# Altium integrated library Altium_MCU.IntLib: 35 symbols (part 1 of 2)
Pins are listed as number, name and electrical type; pins without a type are passive.

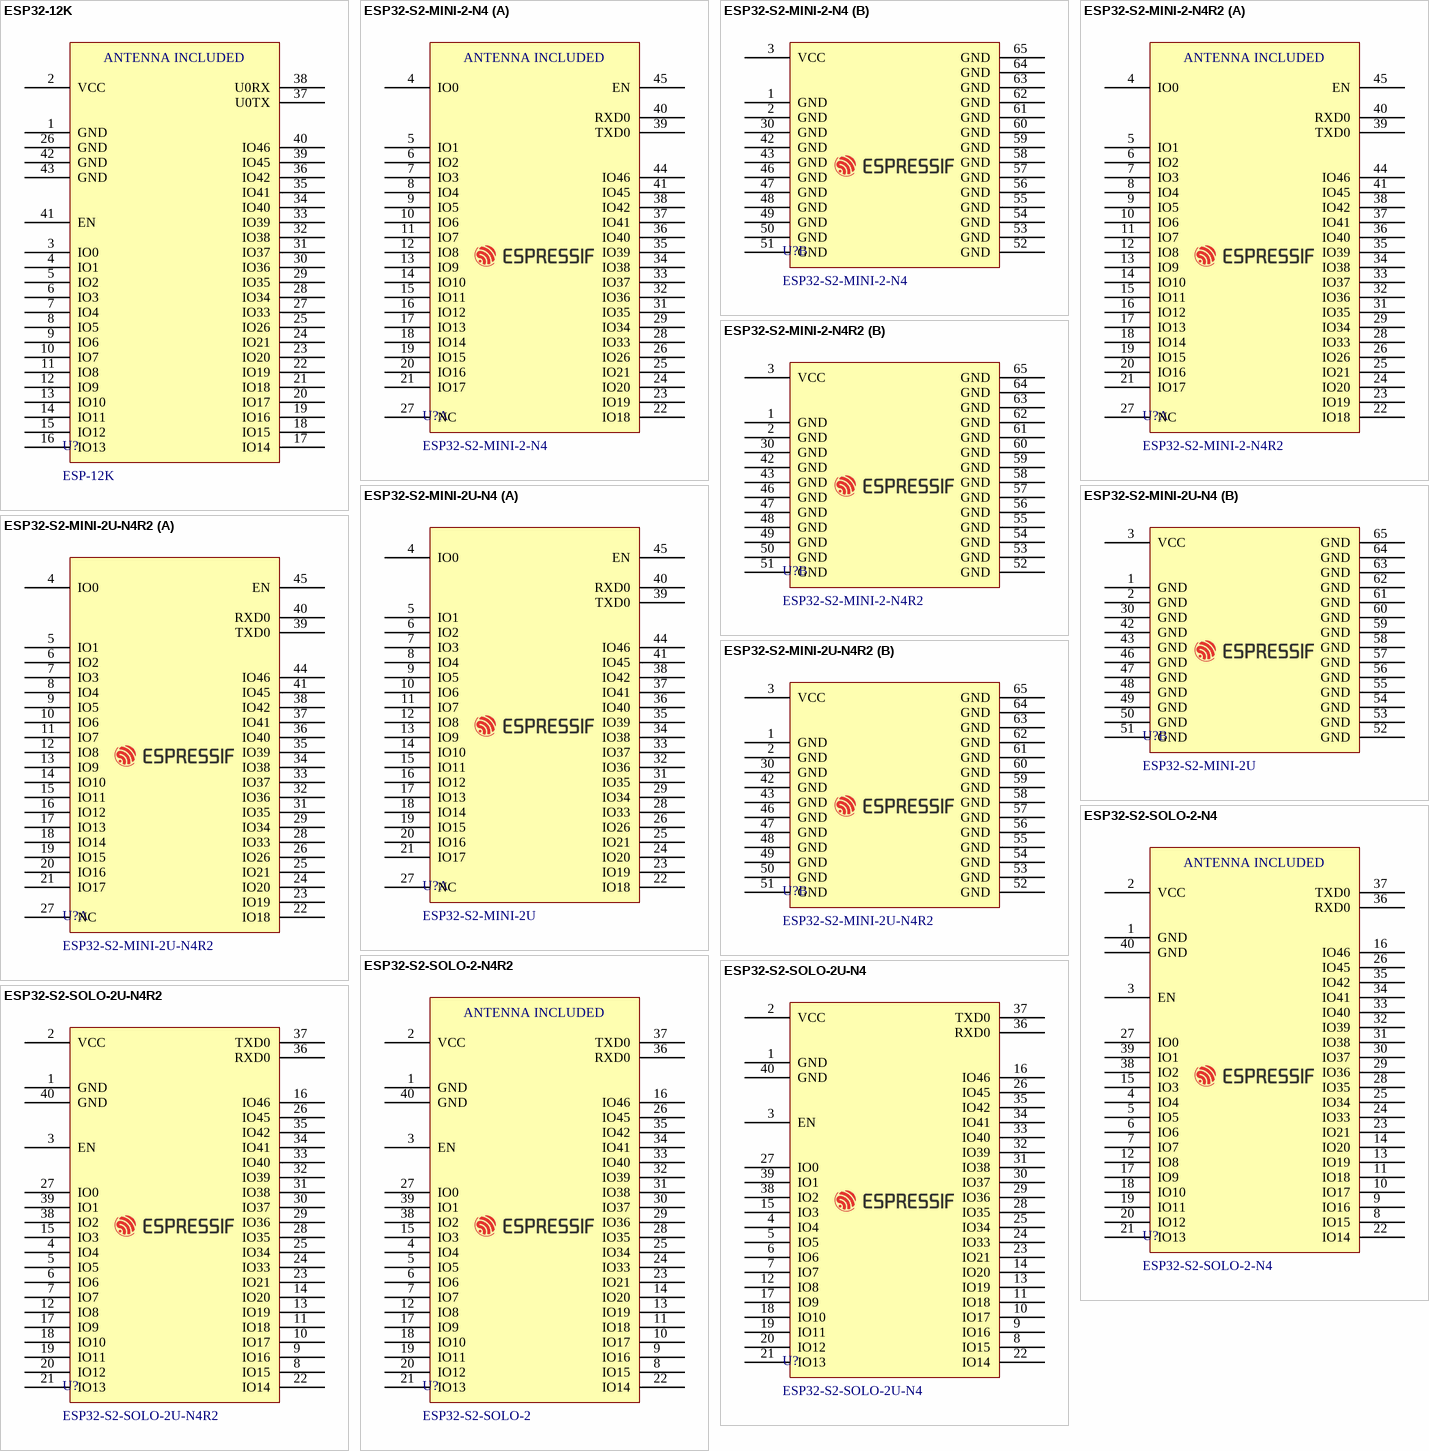
[diagram p0: symbols ESP32-12K to ESP32-S2-SOLO-2U-N4R2]

## ESP32-12K
designator U?, comment ESP-12K
ESP32-S2; Manufacturer: AI-Thinker; Supply Voltage - Max: 3.6 V; Supply Voltage - Min: 3 V; Part Number: ESP-12K; Supplier 1 URL: N/A; Supplier 2 URL: N/A; Supplier 3 URL: https://www.thegioiic.com/esp-12k-8m-psram-esp8266-ai-thinker-mach-thu-phat-wifi; Value: ESP-12K; Manufacturer Part Number: ESP-12K; Packaging: Tape and Reel; Supplier 1: Mouser; Supplier 1 Part Number: N/A; Supplier 2: Digi-Key; Supplier 2 Part Number: N/A; Supplier 3: thegioiic; Supplier 3 Part Number: ESP-12K; Mount: SMD/SMT; Operating Temperature Max: + 85 C; Operating Temperature Min: - 40 C; ComponentLink1Description: Datasheet; ComponentLink1URL: N/A; LCSC Part #: N/A
footprint ESP32-12K (Chip Array, Concave, 41-Leads, Pitch 1.50mm,  Body 31.00x18.00mm,  IPC Medium Density)
pins: 1 GND, 2 VCC, 3 IO0, 4 IO1, 5 IO2, 6 IO3, 7 IO4, 8 IO5, 9 IO6, 10 IO7, 11 IO8, 12 IO9, 13 IO10, 14 IO11, 15 IO12, 16 IO13, 17 IO14, 18 IO15, 19 IO16, 20 IO17, 21 IO18, 22 IO19, 23 IO20, 24 IO21, 25 IO26, 26 GND, 27 IO33, 28 IO34, 29 IO35, 30 IO36, 31 IO37, 32 IO38, 33 IO39, 34 IO40, 35 IO41, 36 IO42, 37 U0TX, 38 U0RX, 39 IO45, 40 IO46, 41 EN, 42 GND, 43 GND
text: ANTENNA INCLUDED

## ESP32-S2-MINI-2-N4
designator U?
ESP32-S2 embedded, Xtensa® single-core 32-bit LX7 microprocessor, up to 240 MHz; Part Number: ESP32-S2-MINI-2-N4A; Manufacturer: Espressif Systems; Supply Voltage - Max: 3.6 V; Supply Voltage - Min: 3 V; Supplier 1 URL: https://www.mouser.com/ProductDetail/Espressif-Systems/ESP32-S2-MINI-2-N4?qs=sGAEpiMZZMu3sxpa5v1qrjXjSzkapvOOr/iFVzmZzOw%3D; Supplier 2 URL: https://www.digikey.cn/en/products/detail/espressif-systems/ESP32-S2-MINI-2-N4/16591891; Supplier 3 URL: N/A; Value: ESP32-S2-MINI-2-N4; Manufacturer Part Number: ESP32-S2-MINI-2-N4; Packaging: Tape and Reel; Supplier 1: Mouser; Supplier 1 Part Number: 356-ESP32MINI-2-N4; Supplier 2: Digi-Key; Supplier 2 Part Number: 1965-ESP32-S2-MINI-2-N4CT-ND; Supplier 3: thegioiic; Supplier 3 Part Number: N/A; Mount: SMD/SMT; Operating Temperature Max: + 85 C; Operating Temperature Min: - 40 C; ComponentLink1Description: Datasheet; ComponentLink1URL: https://www.mouser.com/datasheet/2/891/Espressif_Systems_7_27_2022_ESP32_S2_MINI_22U_EN_V-3002662.pdf; LCSC Part #: N/A
footprint ESP32_MINI_OB_ANTENNA
part A pins: 4 IO0, 5 IO1, 6 IO2, 7 IO3, 8 IO4, 9 IO5, 10 IO6, 11 IO7, 12 IO8, 13 IO9, 14 IO10, 15 IO11, 16 IO12, 17 IO13, 18 IO14, 19 IO15, 20 IO16, 21 IO17, 22 IO18, 23 IO19, 24 IO20, 25 IO21, 26 IO26, 27 NC, 28 IO33, 29 IO34, 31 IO35, 32 IO36, 33 IO37, 34 IO38, 35 IO39, 36 IO40, 37 IO41, 38 IO42, 39 TXD0, 40 RXD0, 41 IO45, 44 IO46, 45 EN
part B pins: 1 GND, 2 GND, 3 VCC, 30 GND, 42 GND, 43 GND, 46 GND, 47 GND, 48 GND, 49 GND, 50 GND, 51 GND, 52 GND, 53 GND, 54 GND, 55 GND, 56 GND, 57 GND, 58 GND, 59 GND, 60 GND, 61 GND, 62 GND, 63 GND, 64 GND, 65 GND
part A text: ANTENNA INCLUDED

## ESP32-S2-MINI-2-N4R2
designator U?
ESP32-S2 embedded, Xtensa® single-core 32-bit LX7 microprocessor, up to 240 MHz; Part Number: ESP32-S2-MINI-2-N4R2A; Manufacturer: Espressif Systems; Supply Voltage - Max: 3.6 V; Supply Voltage - Min: 3 V; Supplier 1 URL: https://www.mouser.com/ProductDetail/Espressif-Systems/ESP32-S2-MINI-2-N4R2?qs=sGAEpiMZZMu3sxpa5v1qrjXjSzkapvOOJC9Dptg9ErI%3D; Supplier 2 URL: https://www.digikey.cn/en/products/detail/espressif-systems/ESP32-S2-MINI-2-N4R2/16591895; Supplier 3 URL: N/A; Value: ESP32-S2-MINI-2-N4R2; Manufacturer Part Number: ESP32-S2-MINI-2-N4R2; Packaging: Tape and Reel; Supplier 1: Mouser; Supplier 1 Part Number: ESP32-S2-MINI-2-N4R2; Supplier 2: Digi-Key; Supplier 2 Part Number: 1965-ESP32-S2-MINI-2-N4R2-ND; Supplier 3: thegioiic; Supplier 3 Part Number: N/A; Mount: SMD/SMT; Operating Temperature Max: + 85 C; Operating Temperature Min: - 40 C; ComponentLink1Description: Datasheet; ComponentLink1URL: https://www.mouser.com/datasheet/2/891/Espressif_Systems_7_27_2022_ESP32_S2_MINI_22U_EN_V-3002662.pdf; LCSC Part #: N/A
footprint ESP32_MINI_OB_ANTENNA
part A pins: 4 IO0, 5 IO1, 6 IO2, 7 IO3, 8 IO4, 9 IO5, 10 IO6, 11 IO7, 12 IO8, 13 IO9, 14 IO10, 15 IO11, 16 IO12, 17 IO13, 18 IO14, 19 IO15, 20 IO16, 21 IO17, 22 IO18, 23 IO19, 24 IO20, 25 IO21, 26 IO26, 27 NC, 28 IO33, 29 IO34, 31 IO35, 32 IO36, 33 IO37, 34 IO38, 35 IO39, 36 IO40, 37 IO41, 38 IO42, 39 TXD0, 40 RXD0, 41 IO45, 44 IO46, 45 EN
part B pins: 1 GND, 2 GND, 3 VCC, 30 GND, 42 GND, 43 GND, 46 GND, 47 GND, 48 GND, 49 GND, 50 GND, 51 GND, 52 GND, 53 GND, 54 GND, 55 GND, 56 GND, 57 GND, 58 GND, 59 GND, 60 GND, 61 GND, 62 GND, 63 GND, 64 GND, 65 GND
part A text: ANTENNA INCLUDED

## ESP32-S2-MINI-2U-N4
designator U?, comment ESP32-S2-MINI-2U
ESP32-S2 embedded, Xtensa® single-core 32-bit LX7 microprocessor, up to 240 MHz; Part Number: ESP32-S2-MINI-2U-N4A; Manufacturer: Espressif Systems; Manufacturer Part Number: ESP32-S2-MINI-2U-N4; Supply Voltage - Max: 3.6 V; Supply Voltage - Min: 3 V; Supplier 1 URL: https://www.mouser.com/ProductDetail/Espressif-Systems/ESP32-S2-MINI-2U-N4?qs=sGAEpiMZZMu3sxpa5v1qrjXjSzkapvOOhy01huix4lM%3D; Supplier 2 URL: N/A; Supplier 3 URL: N/A; Value: ESP32-S2-MINI-2U; Packaging: Tape and Reel; Supplier 1: Mouser; Supplier 1 Part Number: 356-ESP32MINI-2U-N4; Supplier 2: Digi-Key; Supplier 2 Part Number: N/A; Supplier 3: thegioiic; Supplier 3 Part Number: N/A; Mount: SMD/SMT; Operating Temperature Max: + 85 C; Operating Temperature Min: - 40 C; ComponentLink1Description: Datasheet; ComponentLink1URL: https://www.mouser.com/datasheet/2/891/Espressif_Systems_7_27_2022_ESP32_S2_MINI_22U_EN_V-3002662.pdf; LCSC Part #: N/A
footprint ESP32_MINI
part A pins: 4 IO0, 5 IO1, 6 IO2, 7 IO3, 8 IO4, 9 IO5, 10 IO6, 11 IO7, 12 IO8, 13 IO9, 14 IO10, 15 IO11, 16 IO12, 17 IO13, 18 IO14, 19 IO15, 20 IO16, 21 IO17, 22 IO18, 23 IO19, 24 IO20, 25 IO21, 26 IO26, 27 NC, 28 IO33, 29 IO34, 31 IO35, 32 IO36, 33 IO37, 34 IO38, 35 IO39, 36 IO40, 37 IO41, 38 IO42, 39 TXD0, 40 RXD0, 41 IO45, 44 IO46, 45 EN
part B pins: 1 GND, 2 GND, 3 VCC, 30 GND, 42 GND, 43 GND, 46 GND, 47 GND, 48 GND, 49 GND, 50 GND, 51 GND, 52 GND, 53 GND, 54 GND, 55 GND, 56 GND, 57 GND, 58 GND, 59 GND, 60 GND, 61 GND, 62 GND, 63 GND, 64 GND, 65 GND

## ESP32-S2-MINI-2U-N4R2
designator U?
ESP32-S2 embedded, Xtensa® single-core 32-bit LX7 microprocessor, up to 240 MHz; Part Number: ESP32-S2-MINI-2U-N4R2A; Manufacturer: Espressif Systems; Supply Voltage - Max: 3.6 V; Supply Voltage - Min: 3 V; Supplier 1 URL: https://www.mouser.com/ProductDetail/Espressif-Systems/ESP32-S2-MINI-2U-N4R2?qs=sGAEpiMZZMu3sxpa5v1qrjXjSzkapvOOZRm3ki/1tDs%3D; Supplier 2 URL: https://www.digikey.cn/en/products/detail/espressif-systems/ESP32-S2-MINI-2U-N4R2/16591889; Supplier 3 URL: N/A; Value: ESP32-S2-MINI-2U-N4R2; Manufacturer Part Number: ESP32-S2-MINI-2U-N4R2; Packaging: Tape and Reel; Supplier 1: Mouser; Supplier 1 Part Number: 356-ESP32MINI2U-N4R2; Supplier 2: Digi-Key; Supplier 2 Part Number: 1965-ESP32-S2-MINI-2U-N4R2-ND; Supplier 3: thegioiic; Supplier 3 Part Number: N/A; Mount: SMD/SMT; Operating Temperature Max: + 85 C; Operating Temperature Min: - 40 C; ComponentLink1Description: Datasheet; ComponentLink1URL: https://www.mouser.com/datasheet/2/891/Espressif_Systems_7_27_2022_ESP32_S2_MINI_22U_EN_V-3002662.pdf; LCSC Part #: N/A
footprint ESP32_MINI
part A pins: 4 IO0, 5 IO1, 6 IO2, 7 IO3, 8 IO4, 9 IO5, 10 IO6, 11 IO7, 12 IO8, 13 IO9, 14 IO10, 15 IO11, 16 IO12, 17 IO13, 18 IO14, 19 IO15, 20 IO16, 21 IO17, 22 IO18, 23 IO19, 24 IO20, 25 IO21, 26 IO26, 27 NC, 28 IO33, 29 IO34, 31 IO35, 32 IO36, 33 IO37, 34 IO38, 35 IO39, 36 IO40, 37 IO41, 38 IO42, 39 TXD0, 40 RXD0, 41 IO45, 44 IO46, 45 EN
part B pins: 1 GND, 2 GND, 3 VCC, 30 GND, 42 GND, 43 GND, 46 GND, 47 GND, 48 GND, 49 GND, 50 GND, 51 GND, 52 GND, 53 GND, 54 GND, 55 GND, 56 GND, 57 GND, 58 GND, 59 GND, 60 GND, 61 GND, 62 GND, 63 GND, 64 GND, 65 GND

## ESP32-S2-SOLO-2-N4
designator U?
ESP32-S2 embedded, Xtensa® single-core 32-bit LX7 microprocessor, up to 240 MHz; Manufacturer: Espressif Systems; Supply Voltage - Max: 3.6 V; Supply Voltage - Min: 3 V; Part Number: ESP32-S2-SOLO-2-N4; Supplier 1 URL: https://www.mouser.com/ProductDetail/Espressif-Systems/ESP32-S2-SOLO-2-N4?qs=sGAEpiMZZMu3sxpa5v1qrjXjSzkapvOOEC88hoUZJyA%3D; Supplier 2 URL: https://www.digikey.cn/en/products/detail/espressif-systems/ESP32-S2-SOLO-2-N4/16591892; Supplier 3 URL: N/A; Value: ESP32-S2-SOLO-2-N4; Manufacturer Part Number: ESP32-S2-SOLO-2-N4; Packaging: Tape and Reel; Supplier 1: Mouser; Supplier 1 Part Number: 356-ESP32SOLO-2-N4; Supplier 2: Digi-Key; Supplier 2 Part Number: 1965-ESP32-S2-SOLO-2-N4CT-ND; Supplier 3: thegioiic; Supplier 3 Part Number: N/A; Mount: SMD/SMT; Operating Temperature Max: + 85 C; Operating Temperature Min: - 40 C; ComponentLink1Description: Datasheet; ComponentLink1URL: https://www.mouser.com/datasheet/2/891/Espressif_Systems_7_27_2022_ESP32_S2_SOLO_22U_EN_v-3002658.pdf; LCSC Part #: N/A
footprint ESP32_SOLO_OB_ANTENNA
pins: 1 GND, 2 VCC, 3 EN, 4 IO4, 5 IO5, 6 IO6, 7 IO7, 8 IO15, 9 IO16, 10 IO17, 11 IO18, 12 IO8, 13 IO19, 14 IO20, 15 IO3, 16 IO46, 17 IO9, 18 IO10, 19 IO11, 20 IO12, 21 IO13, 22 IO14, 23 IO21, 24 IO33, 25 IO34, 26 IO45, 27 IO0, 28 IO35, 29 IO36, 30 IO37, 31 IO38, 32 IO39, 33 IO40, 34 IO41, 35 IO42, 36 RXD0, 37 TXD0, 38 IO2, 39 IO1, 40 GND
text: ANTENNA INCLUDED

## ESP32-S2-SOLO-2-N4R2
designator U?, comment ESP32-S2-SOLO-2
ESP32-S2 embedded, Xtensa® single-core 32-bit LX7 microprocessor, up to 240 MHz; Part Number: ESP32-S2-SOLO-2-N4R2; Manufacturer: Espressif Systems; Supply Voltage - Max: 3.6 V; Supply Voltage - Min: 3 V; Supplier 1 URL: https://www.mouser.com/ProductDetail/Espressif-Systems/ESP32-S2-SOLO-2-N4R2?qs=sGAEpiMZZMu3sxpa5v1qrjXjSzkapvOO3gwRcSEsnoY%3D; Supplier 2 URL: https://www.digikey.cn/en/products/detail/espressif-systems/ESP32-S2-SOLO-2-N4R2/16591896; Supplier 3 URL: N/A; Value: ESP32-S2-SOLO-2; Manufacturer Part Number: ESP32-S2-SOLO-2-N4R2; Packaging: Tape and Reel; Supplier 1: Mouser; Supplier 1 Part Number: 356-ESP32SOLO-2-N4R2; Supplier 2: Digi-Key; Supplier 2 Part Number: 1965-ESP32-S2-SOLO-2-N4R2TR-ND; Supplier 3: thegioiic; Supplier 3 Part Number: N/A; Mount: SMD/SMT; Operating Temperature Max: + 85 C; Operating Temperature Min: - 40 C; ComponentLink1Description: Datasheet; ComponentLink1URL: https://www.mouser.com/datasheet/2/891/Espressif_Systems_7_27_2022_ESP32_S2_SOLO_22U_EN_v-3002658.pdf; LCSC Part #: N/A
footprint ESP32_SOLO_OB_ANTENNA
pins: 1 GND, 2 VCC, 3 EN, 4 IO4, 5 IO5, 6 IO6, 7 IO7, 8 IO15, 9 IO16, 10 IO17, 11 IO18, 12 IO8, 13 IO19, 14 IO20, 15 IO3, 16 IO46, 17 IO9, 18 IO10, 19 IO11, 20 IO12, 21 IO13, 22 IO14, 23 IO21, 24 IO33, 25 IO34, 26 IO45, 27 IO0, 28 IO35, 29 IO36, 30 IO37, 31 IO38, 32 IO39, 33 IO40, 34 IO41, 35 IO42, 36 RXD0, 37 TXD0, 38 IO2, 39 IO1, 40 GND
text: ANTENNA INCLUDED

## ESP32-S2-SOLO-2U-N4
designator U?
ESP32-S2 embedded, Xtensa® single-core 32-bit LX7 microprocessor, up to 240 MHz; Manufacturer: Espressif Systems; Supply Voltage - Max: 3.6 V; Supply Voltage - Min: 3 V; Part Number: ESP32-S2-SOLO-2U-N4; Supplier 1 URL: https://www.mouser.com/ProductDetail/Espressif-Systems/ESP32-S2-SOLO-2U-N4?qs=sGAEpiMZZMu3sxpa5v1qrjXjSzkapvOOhwzZOR2/Xv4%3D; Supplier 2 URL: https://www.digikey.cn/en/products/detail/espressif-systems/ESP32-S2-SOLO-2U-N4/16591894; Supplier 3 URL: N/A; Value: ESP32-S2-SOLO-2U-N4; Manufacturer Part Number: ESP32-S2-SOLO-2U-N4; Packaging: Tape and Reel; Supplier 1: Mouser; Supplier 1 Part Number: 356-ESP32SOLO-2U-N4; Supplier 2: Digi-Key; Supplier 2 Part Number: 1965-ESP32-S2-SOLO-2U-N4CT-ND; Supplier 3: thegioiic; Supplier 3 Part Number: N/A; Mount: SMD/SMT; Operating Temperature Max: + 85 C; Operating Temperature Min: - 40 C; ComponentLink1Description: Datasheet; ComponentLink1URL: https://www.mouser.com/datasheet/2/891/Espressif_Systems_7_27_2022_ESP32_S2_SOLO_22U_EN_v-3002658.pdf; LCSC Part #: N/A
footprint ESP32_SOLO
pins: 1 GND, 2 VCC, 3 EN, 4 IO4, 5 IO5, 6 IO6, 7 IO7, 8 IO15, 9 IO16, 10 IO17, 11 IO18, 12 IO8, 13 IO19, 14 IO20, 15 IO3, 16 IO46, 17 IO9, 18 IO10, 19 IO11, 20 IO12, 21 IO13, 22 IO14, 23 IO21, 24 IO33, 25 IO34, 26 IO45, 27 IO0, 28 IO35, 29 IO36, 30 IO37, 31 IO38, 32 IO39, 33 IO40, 34 IO41, 35 IO42, 36 RXD0, 37 TXD0, 38 IO2, 39 IO1, 40 GND

## ESP32-S2-SOLO-2U-N4R2
designator U?
ESP32-S2 embedded, Xtensa® single-core 32-bit LX7 microprocessor, up to 240 MHz; Manufacturer: Espressif Systems; Supply Voltage - Max: 3.6 V; Supply Voltage - Min: 3 V; Part Number: ESP32-S2-SOLO-2U-N4R2; Supplier 1 URL: https://www.mouser.com/ProductDetail/Espressif-Systems/ESP32-S2-SOLO-2U-N4R2?qs=sGAEpiMZZMu3sxpa5v1qrjXjSzkapvOO/wRv9SAyZyc%3D; Supplier 2 URL: https://www.digikey.cn/en/products/detail/espressif-systems/esp32-s2-solo-2u-n4r2/16591890; Supplier 3 URL: N/A; Value: ESP32-S2-SOLO-2U-N4R2; Manufacturer Part Number: ESP32-S2-SOLO-2U-N4R2; Packaging: Tape and Reel; Supplier 1: Mouser; Supplier 1 Part Number: 356-ESP32SOLO2U-N4R2; Supplier 2: Digi-Key; Supplier 2 Part Number: 1965-ESP32-S2-SOLO-2U-N4R2CT-ND; Supplier 3: thegioiic; Supplier 3 Part Number: N/A; Mount: SMD/SMT; Operating Temperature Max: + 85 C; Operating Temperature Min: - 40 C; ComponentLink1Description: Datasheet; ComponentLink1URL: https://www.mouser.com/datasheet/2/891/Espressif_Systems_7_27_2022_ESP32_S2_SOLO_22U_EN_v-3002658.pdf; LCSC Part #: N/A
footprint ESP32_SOLO
pins: 1 GND, 2 VCC, 3 EN, 4 IO4, 5 IO5, 6 IO6, 7 IO7, 8 IO15, 9 IO16, 10 IO17, 11 IO18, 12 IO8, 13 IO19, 14 IO20, 15 IO3, 16 IO46, 17 IO9, 18 IO10, 19 IO11, 20 IO12, 21 IO13, 22 IO14, 23 IO21, 24 IO33, 25 IO34, 26 IO45, 27 IO0, 28 IO35, 29 IO36, 30 IO37, 31 IO38, 32 IO39, 33 IO40, 34 IO41, 35 IO42, 36 RXD0, 37 TXD0, 38 IO2, 39 IO1, 40 GND

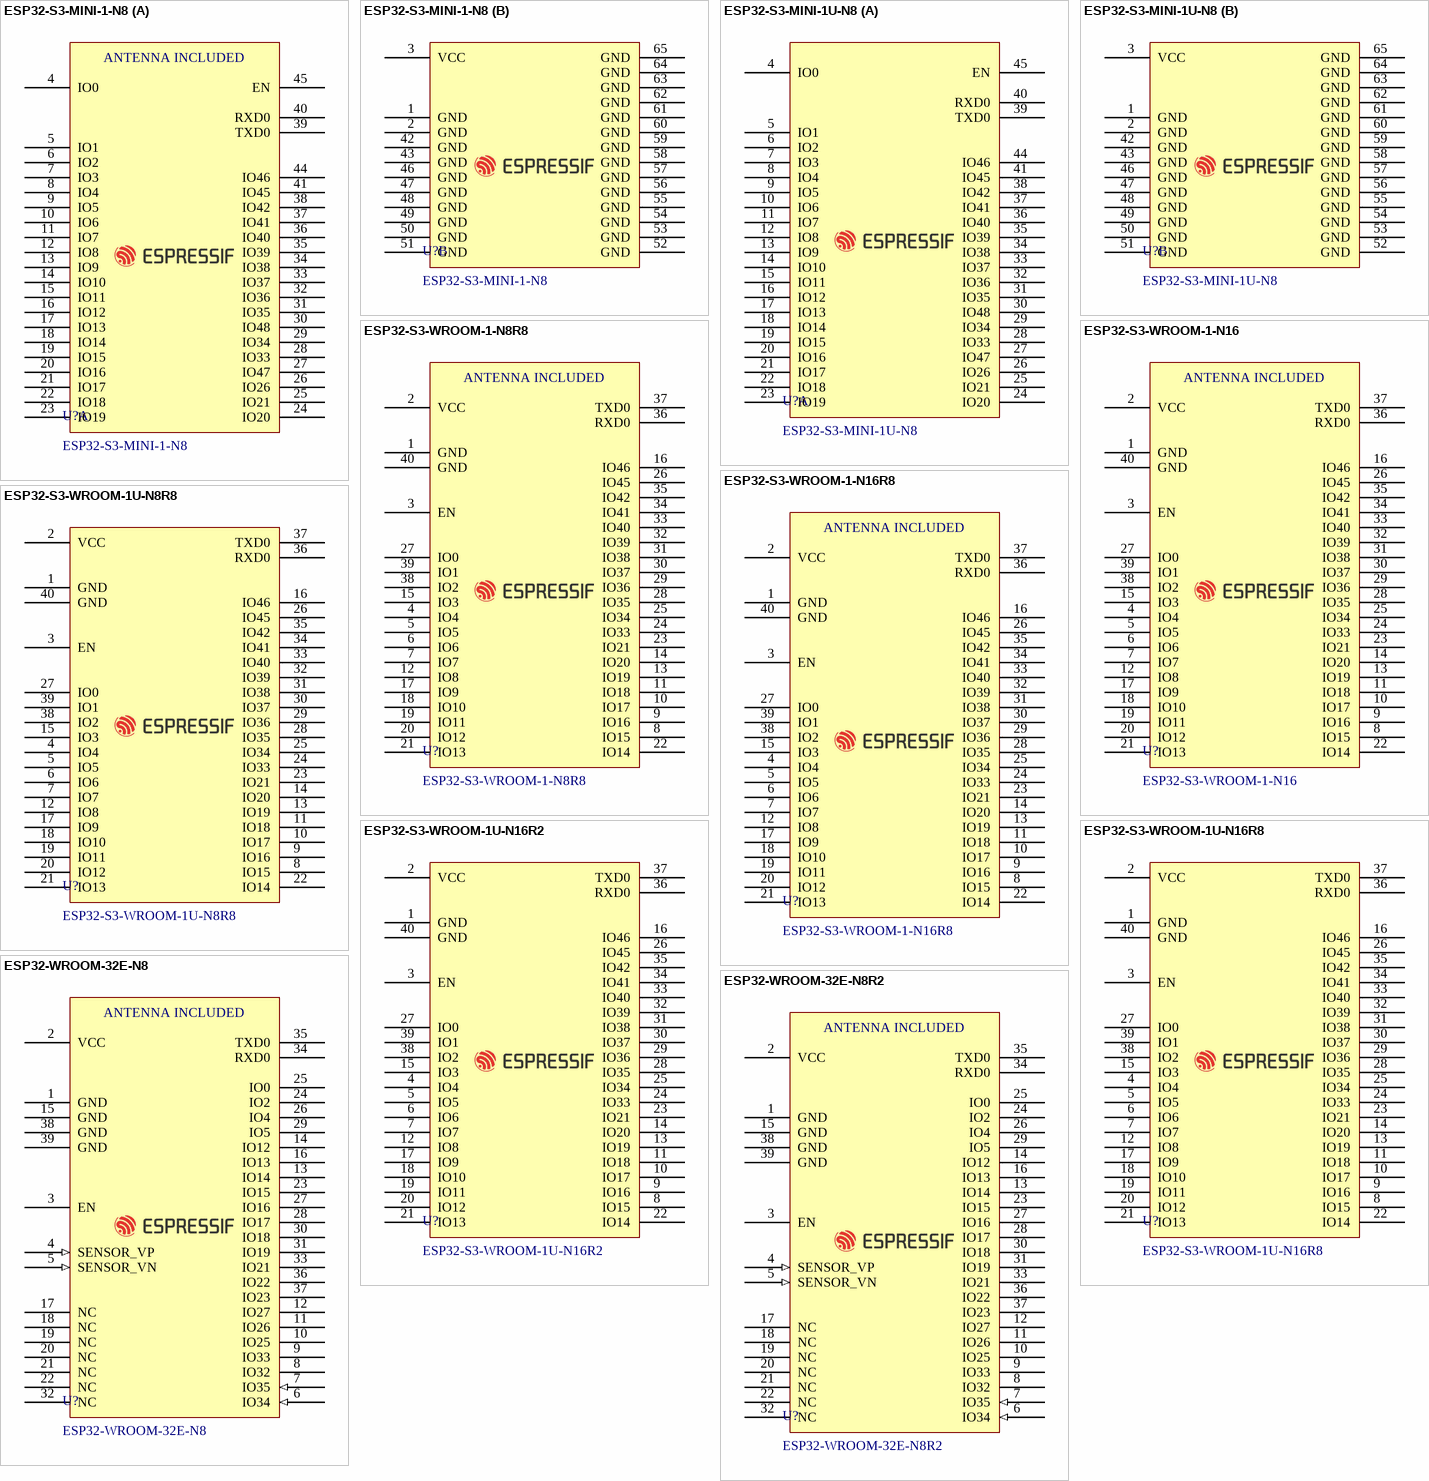
[diagram p1: symbols ESP32-S3-MINI-1-N8 to ESP32-WROOM-32E-N8R2]

## ESP32-S3-MINI-1-N8
designator U?
Xtensa® 32-bit LX7 dual-core processor that operates at up to 240 MHz; Part Number: ESP32-S3-MINI-1-N8A; Manufacturer: Espressif Systems; Supply Voltage - Max: 3.6 V; Supply Voltage - Min: 3 V; Supplier 1 URL: https://www.mouser.com/ProductDetail/Espressif-Systems/ESP32-S3-MINI-1-N8?qs=XAiT9M5g4x82rl6F/IYUQg%3D%3D&utm_source=mouser-refine-download&utm_medium=file&utm_campaign=ESP32-S3-MINI-1-N8&utm_content=Espressif-Systems; Supplier 2 URL: https://www.digikey.com/en/products/detail/espressif-systems/ESP32-S3-MINI-1-N8/15295890; Supplier 3 URL: N/A; Value: ESP32-S3-MINI-1-N8; Manufacturer Part Number: ESP32-S3-MINI-1-N8; Packaging: Tape and Reel; Supplier 1: Mouser; Supplier 1 Part Number: 356-ESP32-S3-MINI1N8; Supplier 2: Digi-Key; Supplier 2 Part Number: 1965-ESP32-S3-MINI-1-N8-ND; Supplier 3: thegioiic; Supplier 3 Part Number: N/A; Mount: SMD/SMT; Operating Temperature Max: + 85 C; Operating Temperature Min: - 40 C; ComponentLink1Description: Datasheet; ComponentLink1URL: https://www.mouser.com/datasheet/2/891/esp32_s3_mini_1_mini_1u_datasheet_en-2997643.pdf; LCSC Part #: N/A
footprint ESP32_MINI_OB_ANTENNA
part A pins: 4 IO0, 5 IO1, 6 IO2, 7 IO3, 8 IO4, 9 IO5, 10 IO6, 11 IO7, 12 IO8, 13 IO9, 14 IO10, 15 IO11, 16 IO12, 17 IO13, 18 IO14, 19 IO15, 20 IO16, 21 IO17, 22 IO18, 23 IO19, 24 IO20, 25 IO21, 26 IO26, 27 IO47, 28 IO33, 29 IO34, 30 IO48, 31 IO35, 32 IO36, 33 IO37, 34 IO38, 35 IO39, 36 IO40, 37 IO41, 38 IO42, 39 TXD0, 40 RXD0, 41 IO45, 44 IO46, 45 EN
part B pins: 1 GND, 2 GND, 3 VCC, 42 GND, 43 GND, 46 GND, 47 GND, 48 GND, 49 GND, 50 GND, 51 GND, 52 GND, 53 GND, 54 GND, 55 GND, 56 GND, 57 GND, 58 GND, 59 GND, 60 GND, 61 GND, 62 GND, 63 GND, 64 GND, 65 GND
part A text: ANTENNA INCLUDED

## ESP32-S3-MINI-1U-N8
designator U?
Xtensa® 32-bit LX7 dual-core processor that operates at up to 240 MHz; Part Number: ESP32-S3-MINI-1U-N8A; Manufacturer: Espressif Systems; Supply Voltage - Max: 3.6 V; Supply Voltage - Min: 3 V; Supplier 1 URL: https://www.mouser.com/ProductDetail/Espressif-Systems/ESP32-S3-MINI-1U-N8?qs=IPgv5n7u5QZ2yjt9dMz22g%3D%3D; Supplier 2 URL: https://www.digikey.com/en/products/detail/espressif-systems/ESP32-S3-MINI-1U-N8/17728863?s=N4IgTCBcDaIKIGUAKBmMBaBL0FkCSAcnugIwCq6BAHCALoC%2BQA; Supplier 3 URL: N/A; Value: ESP32-S3-MINI-1U-N8; Manufacturer Part Number: ESP32-S3-MINI-1U-N8; Packaging: Tape and Reel; Supplier 1: Mouser; Supplier 1 Part Number: 356-ESP32S3MINI1UN8; Supplier 2: Digi-Key; Supplier 2 Part Number: 1965-ESP32-S3-MINI-1U-N8TR-ND; Supplier 3: thegioiic; Supplier 3 Part Number: N/A; Mount: SMD/SMT; Operating Temperature Max: + 85 C; Operating Temperature Min: - 40 C; ComponentLink1Description: Datasheet; ComponentLink1URL: https://www.mouser.com/datasheet/2/891/esp32_s3_mini_1_mini_1u_datasheet_en-2997643.pdf; LCSC Part #: N/A
footprint ESP32_MINI
part A pins: 4 IO0, 5 IO1, 6 IO2, 7 IO3, 8 IO4, 9 IO5, 10 IO6, 11 IO7, 12 IO8, 13 IO9, 14 IO10, 15 IO11, 16 IO12, 17 IO13, 18 IO14, 19 IO15, 20 IO16, 21 IO17, 22 IO18, 23 IO19, 24 IO20, 25 IO21, 26 IO26, 27 IO47, 28 IO33, 29 IO34, 30 IO48, 31 IO35, 32 IO36, 33 IO37, 34 IO38, 35 IO39, 36 IO40, 37 IO41, 38 IO42, 39 TXD0, 40 RXD0, 41 IO45, 44 IO46, 45 EN
part B pins: 1 GND, 2 GND, 3 VCC, 42 GND, 43 GND, 46 GND, 47 GND, 48 GND, 49 GND, 50 GND, 51 GND, 52 GND, 53 GND, 54 GND, 55 GND, 56 GND, 57 GND, 58 GND, 59 GND, 60 GND, 61 GND, 62 GND, 63 GND, 64 GND, 65 GND

## ESP32-S3-WROOM-1-N8R8
designator U?
Xtensa® 32-bit LX7 dual-core processor that operates at up to 240 MHz; Manufacturer: Espressif Systems; Supply Voltage - Max: 3.6 V; Supply Voltage - Min: 3 V; Part Number: ESP32-S3-WROOM-1-N8R8; Supplier 1 URL: N/A; Supplier 2 URL: https://www.digikey.com/en/products/detail/espressif-systems/ESP32-S3-WROOM-1-N8R8/15295891; Supplier 3 URL: N/A; Value: ESP32-S3-WROOM-1-N8R8; Manufacturer Part Number: ESP32-S3-WROOM-1-N8R8; Packaging: Tape and Reel; Supplier 1: Mouser; Supplier 1 Part Number: N/A; Supplier 2: Digi-Key; Supplier 2 Part Number: 1965-ESP32-S3-WROOM-1-N8R8CT-ND; Supplier 3: thegioiic; Supplier 3 Part Number: N/A; Mount: SMD/SMT; Operating Temperature Max: + 85 C; Operating Temperature Min: - 40 C; ComponentLink1Description: Datasheet; ComponentLink1URL: https://www.mouser.com/datasheet/2/891/esp32_s3_wroom_1_wroom_1u_datasheet_en-2930317.pdf; LCSC Part #: N/A
footprint ESP32_SOLO_OB_ANTENNA
pins: 1 GND, 2 VCC, 3 EN, 4 IO4, 5 IO5, 6 IO6, 7 IO7, 8 IO15, 9 IO16, 10 IO17, 11 IO18, 12 IO8, 13 IO19, 14 IO20, 15 IO3, 16 IO46, 17 IO9, 18 IO10, 19 IO11, 20 IO12, 21 IO13, 22 IO14, 23 IO21, 24 IO33, 25 IO34, 26 IO45, 27 IO0, 28 IO35, 29 IO36, 30 IO37, 31 IO38, 32 IO39, 33 IO40, 34 IO41, 35 IO42, 36 RXD0, 37 TXD0, 38 IO2, 39 IO1, 40 GND
text: ANTENNA INCLUDED

## ESP32-S3-WROOM-1-N16
designator U?
Xtensa® 32-bit LX7 dual-core processor that operates at up to 240 MHz; Manufacturer: Espressif Systems; Supply Voltage - Max: 3.6 V; Supply Voltage - Min: 3 V; Part Number: ESP32-S3-WROOM-1-N16; Supplier 1 URL: N/A; Supplier 2 URL: https://www.digikey.com/en/products/detail/espressif-systems/ESP32-S3-WROOM-1-N16/16162647; Supplier 3 URL: N/A; Value: ESP32-S3-WROOM-1-N16; Manufacturer Part Number: ESP32-S3-WROOM-1-N16; Packaging: Tape and Reel; Supplier 1: Mouser; Supplier 1 Part Number: N/A; Supplier 2: Digi-Key; Supplier 2 Part Number: 1965-ESP32-S3-WROOM-1-N16TR-ND; Supplier 3: thegioiic; Supplier 3 Part Number: N/A; Mount: SMD/SMT; Operating Temperature Max: + 85 C; Operating Temperature Min: - 40 C; ComponentLink1Description: Datasheet; ComponentLink1URL: https://www.mouser.com/datasheet/2/891/esp32_s3_wroom_1_wroom_1u_datasheet_en-2930317.pdf; LCSC Part #: N/A
footprint ESP32_SOLO_OB_ANTENNA
pins: 1 GND, 2 VCC, 3 EN, 4 IO4, 5 IO5, 6 IO6, 7 IO7, 8 IO15, 9 IO16, 10 IO17, 11 IO18, 12 IO8, 13 IO19, 14 IO20, 15 IO3, 16 IO46, 17 IO9, 18 IO10, 19 IO11, 20 IO12, 21 IO13, 22 IO14, 23 IO21, 24 IO33, 25 IO34, 26 IO45, 27 IO0, 28 IO35, 29 IO36, 30 IO37, 31 IO38, 32 IO39, 33 IO40, 34 IO41, 35 IO42, 36 RXD0, 37 TXD0, 38 IO2, 39 IO1, 40 GND
text: ANTENNA INCLUDED

## ESP32-S3-WROOM-1-N16R8
designator U?
Xtensa® 32-bit LX7 dual-core processor that operates at up to 240 MHz; Manufacturer: Espressif Systems; Supply Voltage - Max: 3.6 V; Supply Voltage - Min: 3 V; Part Number: ESP32-S3-WROOM-1-N16R8; Supplier 1 URL: N/A; Supplier 2 URL: https://www.digikey.com/en/products/detail/espressif-systems/ESP32-S3-WROOM-1-N16R8/16162642; Supplier 3 URL: N/A; Value: ESP32-S3-WROOM-1-N16R8; Manufacturer Part Number: ESP32-S3-WROOM-1-N16R8; Packaging: Tape and Reel; Supplier 1: Mouser; Supplier 1 Part Number: N/A; Supplier 2: Digi-Key; Supplier 2 Part Number: 1965-ESP32-S3-WROOM-1-N16R8TR-ND; Supplier 3: thegioiic; Supplier 3 Part Number: N/A; Mount: SMD/SMT; Operating Temperature Max: + 85 C; Operating Temperature Min: - 40 C; ComponentLink1Description: Datasheet; ComponentLink1URL: https://www.mouser.com/datasheet/2/891/esp32_s3_wroom_1_wroom_1u_datasheet_en-2930317.pdf; LCSC Part #: N/A
footprint ESP32_SOLO_OB_ANTENNA
pins: 1 GND, 2 VCC, 3 EN, 4 IO4, 5 IO5, 6 IO6, 7 IO7, 8 IO15, 9 IO16, 10 IO17, 11 IO18, 12 IO8, 13 IO19, 14 IO20, 15 IO3, 16 IO46, 17 IO9, 18 IO10, 19 IO11, 20 IO12, 21 IO13, 22 IO14, 23 IO21, 24 IO33, 25 IO34, 26 IO45, 27 IO0, 28 IO35, 29 IO36, 30 IO37, 31 IO38, 32 IO39, 33 IO40, 34 IO41, 35 IO42, 36 RXD0, 37 TXD0, 38 IO2, 39 IO1, 40 GND
text: ANTENNA INCLUDED

## ESP32-S3-WROOM-1U-N8R8
designator U?
Xtensa® 32-bit LX7 dual-core processor that operates at up to 240 MHz; Manufacturer: Espressif Systems; Supply Voltage - Max: 3.6 V; Supply Voltage - Min: 3 V; Part Number: ESP32-S3-WROOM-1U-N8R8; Supplier 1 URL: N/A; Supplier 2 URL: https://www.digikey.com/en/products/detail/espressif-systems/ESP32-S3-WROOM-1U-N8R8/16162638; Supplier 3 URL: N/A; Value: ESP32-S3-WROOM-1U-N8R8; Manufacturer Part Number: ESP32-S3-WROOM-1U-N8R8; Packaging: Tape and Reel; Supplier 1: Mouser; Supplier 1 Part Number: N/A; Supplier 2: Digi-Key; Supplier 2 Part Number: 1965-ESP32-S3-WROOM-1U-N8R8TR-ND; Supplier 3: thegioiic; Supplier 3 Part Number: N/A; Mount: SMD/SMT; Operating Temperature Max: + 85 C; Operating Temperature Min: - 40 C; ComponentLink1Description: Datasheet; ComponentLink1URL: https://www.mouser.com/datasheet/2/891/esp32_s3_wroom_1_wroom_1u_datasheet_en-2930317.pdf; LCSC Part #: N/A
footprint ESP32_SOLO
pins: 1 GND, 2 VCC, 3 EN, 4 IO4, 5 IO5, 6 IO6, 7 IO7, 8 IO15, 9 IO16, 10 IO17, 11 IO18, 12 IO8, 13 IO19, 14 IO20, 15 IO3, 16 IO46, 17 IO9, 18 IO10, 19 IO11, 20 IO12, 21 IO13, 22 IO14, 23 IO21, 24 IO33, 25 IO34, 26 IO45, 27 IO0, 28 IO35, 29 IO36, 30 IO37, 31 IO38, 32 IO39, 33 IO40, 34 IO41, 35 IO42, 36 RXD0, 37 TXD0, 38 IO2, 39 IO1, 40 GND

## ESP32-S3-WROOM-1U-N16R2
designator U?
Xtensa® 32-bit LX7 dual-core processor that operates at up to 240 MHz; Manufacturer: Espressif Systems; Supply Voltage - Max: 3.6 V; Supply Voltage - Min: 3 V; Part Number: ESP32-S3-WROOM-1U-N16R2; Supplier 1 URL: N/A; Supplier 2 URL: https://www.digikey.com/en/products/detail/espressif-systems/ESP32-S3-WROOM-1U-N16R2/16162650; Supplier 3 URL: N/A; Value: ESP32-S3-WROOM-1U-N16R2; Manufacturer Part Number: ESP32-S3-WROOM-1U-N16R2; Packaging: Tape and Reel; Supplier 1: Mouser; Supplier 1 Part Number: N/A; Supplier 2: Digi-Key; Supplier 2 Part Number: 1965-ESP32-S3-WROOM-1U-N16R2TR-ND; Supplier 3: thegioiic; Supplier 3 Part Number: N/A; Mount: SMD/SMT; Operating Temperature Max: + 85 C; Operating Temperature Min: - 40 C; ComponentLink1Description: Datasheet; ComponentLink1URL: https://www.mouser.com/datasheet/2/891/esp32_s3_wroom_1_wroom_1u_datasheet_en-2930317.pdf; LCSC Part #: N/A
footprint ESP32_SOLO
pins: 1 GND, 2 VCC, 3 EN, 4 IO4, 5 IO5, 6 IO6, 7 IO7, 8 IO15, 9 IO16, 10 IO17, 11 IO18, 12 IO8, 13 IO19, 14 IO20, 15 IO3, 16 IO46, 17 IO9, 18 IO10, 19 IO11, 20 IO12, 21 IO13, 22 IO14, 23 IO21, 24 IO33, 25 IO34, 26 IO45, 27 IO0, 28 IO35, 29 IO36, 30 IO37, 31 IO38, 32 IO39, 33 IO40, 34 IO41, 35 IO42, 36 RXD0, 37 TXD0, 38 IO2, 39 IO1, 40 GND

## ESP32-S3-WROOM-1U-N16R8
designator U?
Xtensa® 32-bit LX7 dual-core processor that operates at up to 240 MHz; Manufacturer: Espressif Systems; Supply Voltage - Max: 3.6 V; Supply Voltage - Min: 3 V; Part Number: ESP32-S3-WROOM-1U-N16R8; Supplier 1 URL: N/A; Supplier 2 URL: https://www.digikey.com/en/products/detail/espressif-systems/ESP32-S3-WROOM-1U-N16R8/16162641; Supplier 3 URL: N/A; Value: ESP32-S3-WROOM-1U-N16R8; Manufacturer Part Number: ESP32-S3-WROOM-1U-N16R8; Packaging: Tape and Reel; Supplier 1: Mouser; Supplier 1 Part Number: N/A; Supplier 2: Digi-Key; Supplier 2 Part Number: 1965-ESP32-S3-WROOM-1U-N16R8TR-ND; Supplier 3: thegioiic; Supplier 3 Part Number: N/A; Mount: SMD/SMT; Operating Temperature Max: + 85 C; Operating Temperature Min: - 40 C; ComponentLink1Description: Datasheet; ComponentLink1URL: https://www.mouser.com/datasheet/2/891/esp32_s3_wroom_1_wroom_1u_datasheet_en-2930317.pdf; LCSC Part #: N/A
footprint ESP32_SOLO
pins: 1 GND, 2 VCC, 3 EN, 4 IO4, 5 IO5, 6 IO6, 7 IO7, 8 IO15, 9 IO16, 10 IO17, 11 IO18, 12 IO8, 13 IO19, 14 IO20, 15 IO3, 16 IO46, 17 IO9, 18 IO10, 19 IO11, 20 IO12, 21 IO13, 22 IO14, 23 IO21, 24 IO33, 25 IO34, 26 IO45, 27 IO0, 28 IO35, 29 IO36, 30 IO37, 31 IO38, 32 IO39, 33 IO40, 34 IO41, 35 IO42, 36 RXD0, 37 TXD0, 38 IO2, 39 IO1, 40 GND

## ESP32-WROOM-32E-N8
designator U?
These are ESP32-D0WD-based modules with integrated flash. These modules are well suited for Wi-Fi and Bluetooth/Bluetooth LE-based connectivity applications and provide a solid dual-core performance.; Manufacturer: Espressif Systems; Supply Voltage - Max: 3.6 V; Supply Voltage - Min: 3 V; Part Number: ESP32-WROOM-32E-N8; Supplier 1 URL: N/A; Supplier 2 URL: https://www.digikey.com/en/products/detail/espressif-systems/esp32-wroom-32e-n8/13159522; Supplier 3 URL: N/A; Value: ESP32-WROOM-32E-N8; Manufacturer Part Number: ESP32-WROOM-32E-N8; Packaging: Tape and Reel; Supplier 1: Mouser; Supplier 1 Part Number: N/A; Supplier 2: Digi-Key; Supplier 2 Part Number: 1965-ESP32-WROOM-32E-N8TR-ND; Supplier 3: thegioiic; Supplier 3 Part Number: N/A; Mount: SMD/SMT; Operating Temperature Max: + 85 C; Operating Temperature Min: - 40 C; ComponentLink1Description: Datasheet; ComponentLink1URL: https://www.mouser.com/datasheet/2/891/esp32_wroom_32e_esp32_wroom_32ue_datasheet_en-1855879.pdf; LCSC Part #: C701342
footprint ESP32_WROOM_OB_ANTENNA
pins: 1 GND, 2 VCC, 3 EN, 4 SENSOR_VP (in), 5 SENSOR_VN (in), 6 IO34 (in), 7 IO35 (in), 8 IO32, 9 IO33, 10 IO25, 11 IO26, 12 IO27, 13 IO14, 14 IO12, 15 GND, 16 IO13, 17 NC, 18 NC, 19 NC, 20 NC, 21 NC, 22 NC, 23 IO15, 24 IO2, 25 IO0, 26 IO4, 27 IO16, 28 IO17, 29 IO5, 30 IO18, 31 IO19, 32 NC, 33 IO21, 34 RXD0, 35 TXD0, 36 IO22, 37 IO23, 38 GND, 39 GND
text: ANTENNA INCLUDED

## ESP32-WROOM-32E-N8R2
designator U?
These are ESP32-D0WD-based modules with integrated flash. These modules are well suited for Wi-Fi and Bluetooth/Bluetooth LE-based connectivity applications and provide a solid dual-core performance.; Manufacturer: Espressif Systems; Supply Voltage - Max: 3.6 V; Supply Voltage - Min: 3 V; Part Number: ESP32-WROOM-32E-N8R2; Supplier 1 URL: https://www.mouser.vn/ProductDetail/Espressif-Systems/ESP32-WROOM-32E-N8R2?qs=By6Nw2ByBD0mvGJSS3Ohlw%3D%3D; Supplier 2 URL: https://www.digikey.com/en/products/detail/espressif-systems/ESP32-WROOM-32E-N8R2/16733099?s=N4IgTCBcDaIKIGUAKBmMBaA6gJQPK4Fl0050A5ADmwgF0BfIA; Supplier 3 URL: N/A; Value: ESP32-WROOM-32E-N8R2; Manufacturer Part Number: ESP32-WROOM-32E-N8R2; Packaging: Tape and Reel; Supplier 1: Mouser; Supplier 1 Part Number: 356-ESP32WRM32EN8R2; Supplier 2: Digi-Key; Supplier 2 Part Number: 1965-ESP32-WROOM-32E-N8R2TR-ND; Supplier 3: thegioiic; Supplier 3 Part Number: N/A; Mount: SMD/SMT; Operating Temperature Max: + 85 C; Operating Temperature Min: - 40 C; ComponentLink1Description: Datasheet; ComponentLink1URL: https://www.mouser.com/datasheet/2/891/esp32_wroom_32e_esp32_wroom_32ue_datasheet_en-1855879.pdf; LCSC Part #: C5361945
footprint ESP32_WROOM_OB_ANTENNA
pins: 1 GND, 2 VCC, 3 EN, 4 SENSOR_VP (in), 5 SENSOR_VN (in), 6 IO34 (in), 7 IO35 (in), 8 IO32, 9 IO33, 10 IO25, 11 IO26, 12 IO27, 13 IO14, 14 IO12, 15 GND, 16 IO13, 17 NC, 18 NC, 19 NC, 20 NC, 21 NC, 22 NC, 23 IO15, 24 IO2, 25 IO0, 26 IO4, 27 IO16, 28 IO17, 29 IO5, 30 IO18, 31 IO19, 32 NC, 33 IO21, 34 RXD0, 35 TXD0, 36 IO22, 37 IO23, 38 GND, 39 GND
text: ANTENNA INCLUDED

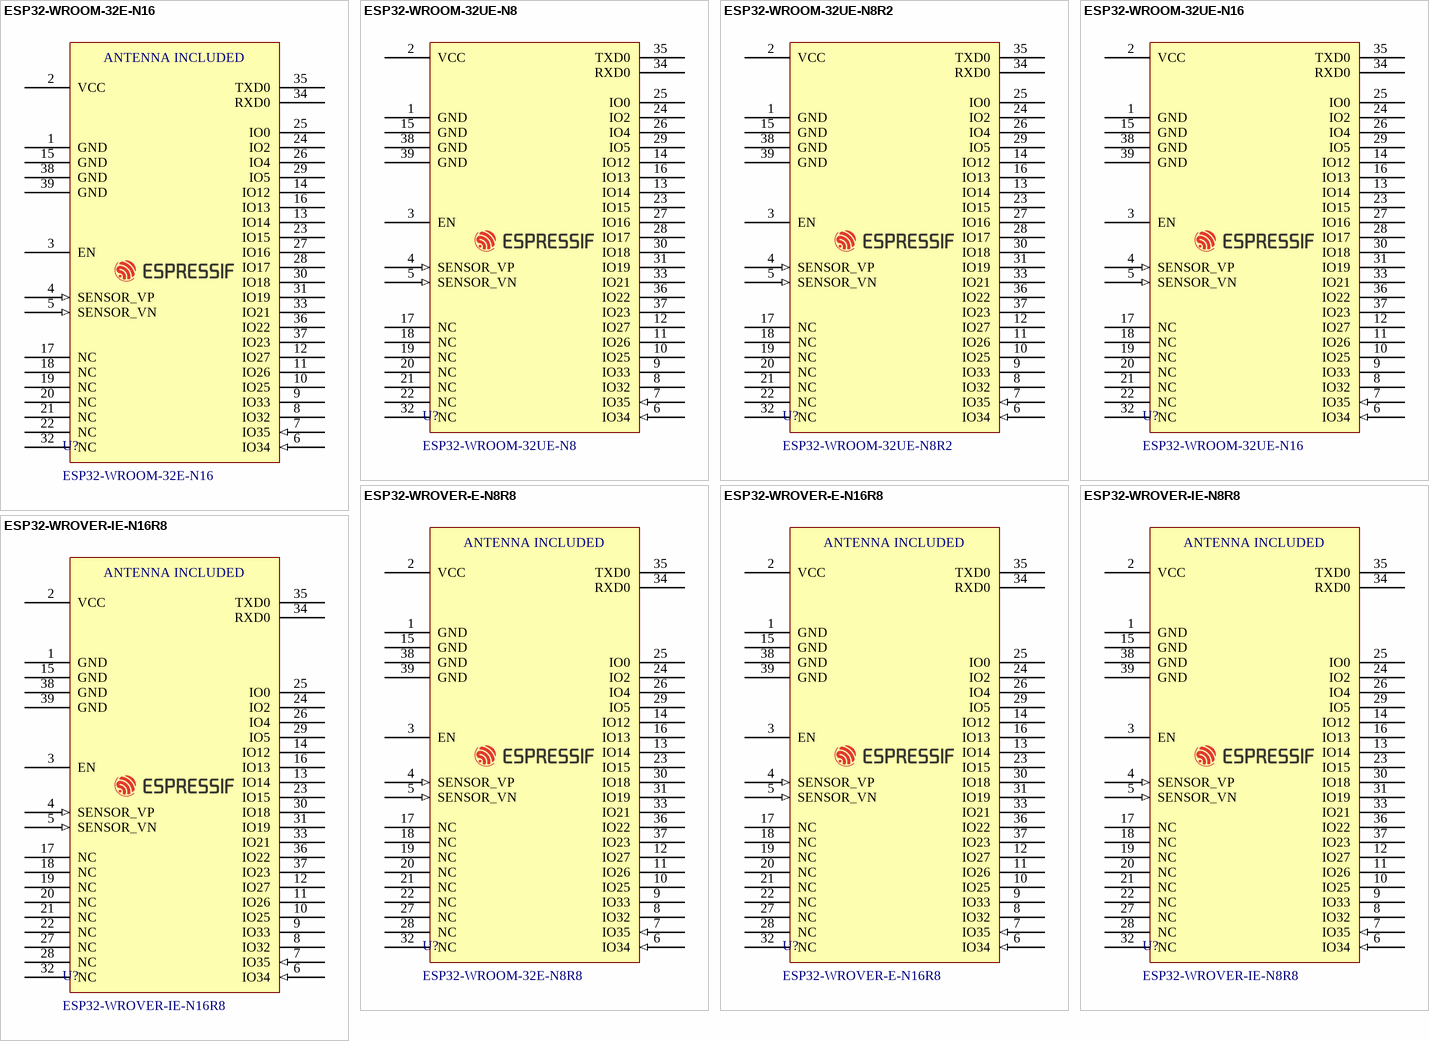
[diagram p2: symbols ESP32-WROOM-32E-N16 to ESP32-WROVER-IE-N16R8]

## ESP32-WROOM-32E-N16
designator U?
These are ESP32-D0WD-based modules with integrated flash. These modules are well suited for Wi-Fi and Bluetooth/Bluetooth LE-based connectivity applications and provide a solid dual-core performance.; Manufacturer: Espressif Systems; Supply Voltage - Max: 3.6 V; Supply Voltage - Min: 3 V; Part Number: ESP32-WROOM-32E-N16; Supplier 1 URL: N/A; Supplier 2 URL: https://www.digikey.com/en/products/detail/espressif-systems/ESP32-WROOM-32E-16MB/11613144; Supplier 3 URL: N/A; Value: ESP32-WROOM-32E-N16; Manufacturer Part Number: ESP32-WROOM-32E-N16; Packaging: Tape and Reel; Supplier 1: Mouser; Supplier 1 Part Number: N/A; Supplier 2: Digi-Key; Supplier 2 Part Number: 1965-ESP32-WROOM-32E-N16TR-ND; Supplier 3: thegioiic; Supplier 3 Part Number: N/A; Mount: SMD/SMT; Operating Temperature Max: + 85 C; Operating Temperature Min: - 40 C; ComponentLink1Description: Datasheet; ComponentLink1URL: https://www.mouser.com/datasheet/2/891/esp32_wroom_32e_esp32_wroom_32ue_datasheet_en-1855879.pdf; LCSC Part #: C701343
footprint ESP32_WROOM_OB_ANTENNA
pins: 1 GND, 2 VCC, 3 EN, 4 SENSOR_VP (in), 5 SENSOR_VN (in), 6 IO34 (in), 7 IO35 (in), 8 IO32, 9 IO33, 10 IO25, 11 IO26, 12 IO27, 13 IO14, 14 IO12, 15 GND, 16 IO13, 17 NC, 18 NC, 19 NC, 20 NC, 21 NC, 22 NC, 23 IO15, 24 IO2, 25 IO0, 26 IO4, 27 IO16, 28 IO17, 29 IO5, 30 IO18, 31 IO19, 32 NC, 33 IO21, 34 RXD0, 35 TXD0, 36 IO22, 37 IO23, 38 GND, 39 GND
text: ANTENNA INCLUDED

## ESP32-WROOM-32UE-N8
designator U?
These are ESP32-D0WD-based modules with integrated flash. These modules are well suited for Wi-Fi and Bluetooth/Bluetooth LE-based connectivity applications and provide a solid dual-core performance.; Manufacturer: Espressif Systems; Supply Voltage - Max: 3.6 V; Supply Voltage - Min: 3 V; Part Number: ESP32-WROOM-32UE-N8; Supplier 1 URL: N/A; Supplier 2 URL: https://www.digikey.com/en/products/detail/espressif-systems/ESP32-WROOM-32UE-8MB/11613142; Supplier 3 URL: N/A; Value: ESP32-WROOM-32UE-N8; Manufacturer Part Number: ESP32-WROOM-32UE-N8; Packaging: Tape and Reel; Supplier 1: Mouser; Supplier 1 Part Number: N/A; Supplier 2: Digi-Key; Supplier 2 Part Number: 1965-ESP32-WROOM-32UE-N8TR-ND; Supplier 3: thegioiic; Supplier 3 Part Number: N/A; Mount: SMD/SMT; Operating Temperature Max: + 85 C; Operating Temperature Min: - 40 C; ComponentLink1Description: Datasheet; ComponentLink1URL: https://www.mouser.com/datasheet/2/891/esp32_wroom_32e_esp32_wroom_32ue_datasheet_en-1855879.pdf; LCSC Part #: C701345
footprint ESP32_WROOM
pins: 1 GND, 2 VCC, 3 EN, 4 SENSOR_VP (in), 5 SENSOR_VN (in), 6 IO34 (in), 7 IO35 (in), 8 IO32, 9 IO33, 10 IO25, 11 IO26, 12 IO27, 13 IO14, 14 IO12, 15 GND, 16 IO13, 17 NC, 18 NC, 19 NC, 20 NC, 21 NC, 22 NC, 23 IO15, 24 IO2, 25 IO0, 26 IO4, 27 IO16, 28 IO17, 29 IO5, 30 IO18, 31 IO19, 32 NC, 33 IO21, 34 RXD0, 35 TXD0, 36 IO22, 37 IO23, 38 GND, 39 GND

## ESP32-WROOM-32UE-N8R2
designator U?
These are ESP32-D0WD-based modules with integrated flash. These modules are well suited for Wi-Fi and Bluetooth/Bluetooth LE-based connectivity applications and provide a solid dual-core performance.; Manufacturer: Espressif Systems; Supply Voltage - Max: 3.6 V; Supply Voltage - Min: 3 V; Part Number: ESP32-WROOM-32UE-N8R2; Supplier 1 URL: N/A; Supplier 2 URL: https://www.digikey.com/en/products/detail/espressif-systems/ESP32-WROOM-32UE-N8R2/16733086?s=N4IgTCBcDaIKIGUAKBmMBaA6gJQPK4Fl00BVOdAOQA5sIBdAXyA; Supplier 3 URL: N/A; Value: ESP32-WROOM-32UE-N8R2; Manufacturer Part Number: ESP32-WROOM-32UE-N8R2; Packaging: Tape and Reel; Supplier 1: Mouser; Supplier 1 Part Number: N/A; Supplier 2: Digi-Key; Supplier 2 Part Number: 1965-ESP32-WROOM-32UE-N8R2TR-ND; Supplier 3: thegioiic; Supplier 3 Part Number: N/A; Mount: SMD/SMT; Operating Temperature Max: + 85 C; Operating Temperature Min: - 40 C; ComponentLink1Description: Datasheet; ComponentLink1URL: https://www.mouser.com/datasheet/2/891/esp32_wroom_32e_esp32_wroom_32ue_datasheet_en-1855879.pdf; LCSC Part #: N/A
footprint ESP32_WROOM
pins: 1 GND, 2 VCC, 3 EN, 4 SENSOR_VP (in), 5 SENSOR_VN (in), 6 IO34 (in), 7 IO35 (in), 8 IO32, 9 IO33, 10 IO25, 11 IO26, 12 IO27, 13 IO14, 14 IO12, 15 GND, 16 IO13, 17 NC, 18 NC, 19 NC, 20 NC, 21 NC, 22 NC, 23 IO15, 24 IO2, 25 IO0, 26 IO4, 27 IO16, 28 IO17, 29 IO5, 30 IO18, 31 IO19, 32 NC, 33 IO21, 34 RXD0, 35 TXD0, 36 IO22, 37 IO23, 38 GND, 39 GND

## ESP32-WROOM-32UE-N16
designator U?
These are ESP32-D0WD-based modules with integrated flash. These modules are well suited for Wi-Fi and Bluetooth/Bluetooth LE-based connectivity applications and provide a solid dual-core performance.; Manufacturer: Espressif Systems; Supply Voltage - Max: 3.6 V; Supply Voltage - Min: 3 V; Part Number: ESP32-WROOM-32UE-N16; Supplier 1 URL: N/A; Supplier 2 URL: https://www.digikey.com/en/products/detail/espressif-systems/ESP32-WROOM-32UE-16MB/11613145; Supplier 3 URL: N/A; Value: ESP32-WROOM-32UE-N16; Manufacturer Part Number: ESP32-WROOM-32UE-N16; Packaging: Tape and Reel; Supplier 1: Mouser; Supplier 1 Part Number: N/A; Supplier 2: Digi-Key; Supplier 2 Part Number: 1965-ESP32-WROOM-32UE-N16TR-ND; Supplier 3: thegioiic; Supplier 3 Part Number: N/A; Mount: SMD/SMT; Operating Temperature Max: + 85 C; Operating Temperature Min: - 40 C; ComponentLink1Description: Datasheet; ComponentLink1URL: https://www.mouser.com/datasheet/2/891/esp32_wroom_32e_esp32_wroom_32ue_datasheet_en-1855879.pdf; LCSC Part #: C701346
footprint ESP32_WROOM
pins: 1 GND, 2 VCC, 3 EN, 4 SENSOR_VP (in), 5 SENSOR_VN (in), 6 IO34 (in), 7 IO35 (in), 8 IO32, 9 IO33, 10 IO25, 11 IO26, 12 IO27, 13 IO14, 14 IO12, 15 GND, 16 IO13, 17 NC, 18 NC, 19 NC, 20 NC, 21 NC, 22 NC, 23 IO15, 24 IO2, 25 IO0, 26 IO4, 27 IO16, 28 IO17, 29 IO5, 30 IO18, 31 IO19, 32 NC, 33 IO21, 34 RXD0, 35 TXD0, 36 IO22, 37 IO23, 38 GND, 39 GND

## ESP32-WROVER-E-N8R8
designator U?, comment ESP32-WROOM-32E-N8R8
The ESP32-WROVER series is based on ESP32-D0WD SoC, having also integrated flash memory and SPIRAM. It achieves a fine dual-core performance, and is well suited for applications requiring more memory, such as AIoT and gateway applications.; Part Number: ESP32-WROVER-E-N8R8; Manufacturer: Espressif Systems; Supply Voltage - Max: 3.6 V; Supply Voltage - Min: 3 V; Supplier 1 URL: N/A; Supplier 2 URL: https://www.digikey.com/en/products/detail/espressif-systems/ESP32-WROVER-E-8MB/11613126; Supplier 3 URL: N/A; Value: ESP32-WROOM-32E-N8R8; Manufacturer Part Number: ESP32-WROVER-E-N8R8; Packaging: Tape and Reel; Supplier 1: Mouser; Supplier 1 Part Number: N/A; Supplier 2: Digi-Key; Supplier 2 Part Number: 1965-ESP32-WROVER-E-N8R8TR-ND; Supplier 3: thegioiic; Supplier 3 Part Number: N/A; Mount: SMD/SMT; Operating Temperature Max: + 85 C; Operating Temperature Min: - 40 C; ComponentLink1Description: Datasheet; ComponentLink1URL: https://www.mouser.com/datasheet/2/891/esp32_wrover_e_esp32_wrover_ie_datasheet_en-1855913.pdf; LCSC Part #: N/A
footprint ESP32_WROVER_E
pins: 1 GND, 2 VCC, 3 EN, 4 SENSOR_VP (in), 5 SENSOR_VN (in), 6 IO34 (in), 7 IO35 (in), 8 IO32, 9 IO33, 10 IO25, 11 IO26, 12 IO27, 13 IO14, 14 IO12, 15 GND, 16 IO13, 17 NC, 18 NC, 19 NC, 20 NC, 21 NC, 22 NC, 23 IO15, 24 IO2, 25 IO0, 26 IO4, 27 NC, 28 NC, 29 IO5, 30 IO18, 31 IO19, 32 NC, 33 IO21, 34 RXD0, 35 TXD0, 36 IO22, 37 IO23, 38 GND, 39 GND
text: ANTENNA INCLUDED

## ESP32-WROVER-E-N16R8
designator U?
The ESP32-WROVER series is based on ESP32-D0WD SoC, having also integrated flash memory and SPIRAM. It achieves a fine dual-core performance, and is well suited for applications requiring more memory, such as AIoT and gateway applications.; Manufacturer: Espressif Systems; Supply Voltage - Max: 3.6 V; Supply Voltage - Min: 3 V; Part Number: ESP32-WROVER-E-N16R8; Supplier 1 URL: N/A; Supplier 2 URL: https://www.digikey.com/en/products/detail/espressif-systems/ESP32-WROVER-E-16MB/11613135; Supplier 3 URL: N/A; Value: ESP32-WROVER-E-N16R8; Manufacturer Part Number: ESP32-WROVER-E-N16R8; Packaging: Tape and Reel; Supplier 1: Mouser; Supplier 1 Part Number: N/A; Supplier 2: Digi-Key; Supplier 2 Part Number: 1965-ESP32-WROVER-E-N16R8TR-ND; Supplier 3: thegioiic; Supplier 3 Part Number: N/A; Mount: SMD/SMT; Operating Temperature Max: + 85 C; Operating Temperature Min: - 40 C; ComponentLink1Description: Datasheet; ComponentLink1URL: https://www.mouser.com/datasheet/2/891/esp32_wrover_e_esp32_wrover_ie_datasheet_en-1855913.pdf; LCSC Part #: N/A
footprint ESP32_WROVER_E
pins: 1 GND, 2 VCC, 3 EN, 4 SENSOR_VP (in), 5 SENSOR_VN (in), 6 IO34 (in), 7 IO35 (in), 8 IO32, 9 IO33, 10 IO25, 11 IO26, 12 IO27, 13 IO14, 14 IO12, 15 GND, 16 IO13, 17 NC, 18 NC, 19 NC, 20 NC, 21 NC, 22 NC, 23 IO15, 24 IO2, 25 IO0, 26 IO4, 27 NC, 28 NC, 29 IO5, 30 IO18, 31 IO19, 32 NC, 33 IO21, 34 RXD0, 35 TXD0, 36 IO22, 37 IO23, 38 GND, 39 GND
text: ANTENNA INCLUDED

## ESP32-WROVER-IE-N8R8
designator U?
The ESP32-WROVER series is based on ESP32-D0WD SoC, having also integrated flash memory and SPIRAM. It achieves a fine dual-core performance, and is well suited for applications requiring more memory, such as AIoT and gateway applications.; Manufacturer: Espressif Systems; Supply Voltage - Max: 3.6 V; Supply Voltage - Min: 3 V; Part Number: ESP32-WROVER-IE-N8R8; Supplier 1 URL: N/A; Supplier 2 URL: https://www.digikey.com/en/products/detail/espressif-systems/ESP32-WROVER-IE-8MB/11613139; Supplier 3 URL: N/A; Value: ESP32-WROVER-IE-N8R8; Manufacturer Part Number: ESP32-WROVER-IE-N8R8; Packaging: Tape and Reel; Supplier 1: Mouser; Supplier 1 Part Number: N/A; Supplier 2: Digi-Key; Supplier 2 Part Number: 1965-ESP32-WROVER-IE-N8R8TR-ND; Supplier 3: thegioiic; Supplier 3 Part Number: N/A; Mount: SMD/SMT; Operating Temperature Max: + 85 C; Operating Temperature Min: - 40 C; ComponentLink1Description: Datasheet; ComponentLink1URL: https://www.mouser.com/datasheet/2/891/esp32_wrover_e_esp32_wrover_ie_datasheet_en-1855913.pdf; LCSC Part #: N/A
footprint ESP32_WROVER_IE
pins: 1 GND, 2 VCC, 3 EN, 4 SENSOR_VP (in), 5 SENSOR_VN (in), 6 IO34 (in), 7 IO35 (in), 8 IO32, 9 IO33, 10 IO25, 11 IO26, 12 IO27, 13 IO14, 14 IO12, 15 GND, 16 IO13, 17 NC, 18 NC, 19 NC, 20 NC, 21 NC, 22 NC, 23 IO15, 24 IO2, 25 IO0, 26 IO4, 27 NC, 28 NC, 29 IO5, 30 IO18, 31 IO19, 32 NC, 33 IO21, 34 RXD0, 35 TXD0, 36 IO22, 37 IO23, 38 GND, 39 GND
text: ANTENNA INCLUDED

## ESP32-WROVER-IE-N16R8
designator U?
The ESP32-WROVER series is based on ESP32-D0WD SoC, having also integrated flash memory and SPIRAM. It achieves a fine dual-core performance, and is well suited for applications requiring more memory, such as AIoT and gateway applications.; Manufacturer: Espressif Systems; Supply Voltage - Max: 3.6 V; Supply Voltage - Min: 3 V; Part Number: ESP32-WROVER-IE-N16R8; Supplier 1 URL: N/A; Supplier 2 URL: https://www.digikey.com/en/products/detail/espressif-systems/ESP32-WROVER-IE-16MB/11613133; Supplier 3 URL: N/A; Value: ESP32-WROVER-IE-N16R8; Manufacturer Part Number: ESP32-WROVER-IE-N16R8; Packaging: Tape and Reel; Supplier 1: Mouser; Supplier 1 Part Number: N/A; Supplier 2: Digi-Key; Supplier 2 Part Number: 1965-ESP32-WROVER-IE-N16R8TR-ND; Supplier 3: thegioiic; Supplier 3 Part Number: N/A; Mount: SMD/SMT; Operating Temperature Max: + 85 C; Operating Temperature Min: - 40 C; ComponentLink1Description: Datasheet; ComponentLink1URL: https://www.mouser.com/datasheet/2/891/esp32_wrover_e_esp32_wrover_ie_datasheet_en-1855913.pdf; LCSC Part #: N/A
footprint ESP32_WROVER_IE
pins: 1 GND, 2 VCC, 3 EN, 4 SENSOR_VP (in), 5 SENSOR_VN (in), 6 IO34 (in), 7 IO35 (in), 8 IO32, 9 IO33, 10 IO25, 11 IO26, 12 IO27, 13 IO14, 14 IO12, 15 GND, 16 IO13, 17 NC, 18 NC, 19 NC, 20 NC, 21 NC, 22 NC, 23 IO15, 24 IO2, 25 IO0, 26 IO4, 27 NC, 28 NC, 29 IO5, 30 IO18, 31 IO19, 32 NC, 33 IO21, 34 RXD0, 35 TXD0, 36 IO22, 37 IO23, 38 GND, 39 GND
text: ANTENNA INCLUDED


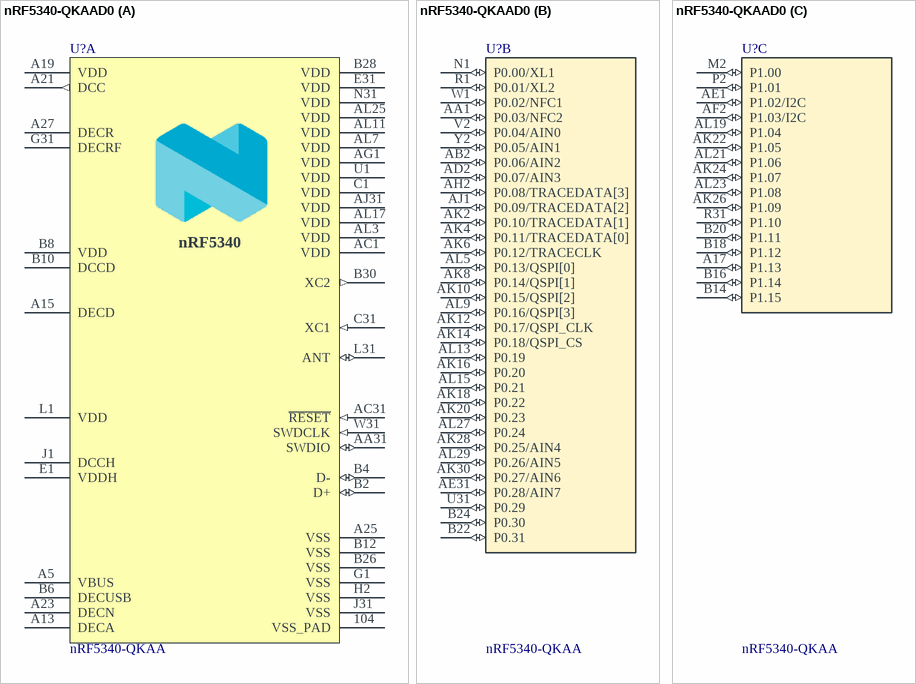
[diagram p3: symbol nRF5340-QKAAD0]

## nRF5340-QKAAD0
designator U?, comment nRF5340-QKAA
Multi-protocol Bluetooth Low Energy, IEEE 802.15.4, ANT and 2.4GHz proprietary system-on-chip; Manufacturer: Nordic Semiconductor; Manufacturer Part Number: nRF5340-QKAAD0; Pad Count: 98; Component Status: Active; Supply Voltage - Max: 5.5 V; Supply Voltage - Min: 1.7 V; Value: nRF5340-QKAA; Component Class: nRF_Devices; Author: rsk; Supplier 1 URL: https://www.mouser.sg/ProductDetail/Nordic-Semiconductor/nRF5340-CLAA-R7?qs=81r%252BiQLm7BTmf4A0GmRDng%3D%3D; Supplier 2 URL: N/A; Supplier 3 URL: N/A; Supplier 1: Mouser; Supplier 1 Part Number: nRF5340-QKAAD0; Supplier 2: Digi-Key; Supplier 2 Part Number: N/A; Supplier 3: thegioiic; Supplier 3 Part Number: N/A; Mount: SMD/SMT; Operating Temperature Max: + 85 C; Operating Temperature Min: - 40 C; Package / Case: AQFN-98; ComponentLink1Description: Datasheet; ComponentLink1URL: https://www.mouser.sg/datasheet/2/297/nRF5340_OPS_v0_5_1-1929595.pdf
footprint nRF5340-QKAAD0 (AQFN40P700X700X85_HS-99N)
part A pins: 104 VSS_PAD (power), A5 VBUS (power), A13 DECA (power), A15 DECD (power), A19 VDD (power), A21 DCC (out), A23 DECN (power), A25 VSS (power), A27 DECR (power), AA31 SWDIO (io), AC1 VDD (power), AC31 ~{RESET} (in), AG1 VDD (power), AG31 N.C. hidden, AJ31 VDD (power), AL3 VDD (power), AL7 VDD (power), AL11 VDD (power), AL17 VDD (power), AL25 VDD (power), B2 D+ (io), B4 D- (io), B6 DECUSB (power), B8 VDD (power), B10 DCCD (power), B12 VSS (power), B26 VSS (power), B28 VDD (power), B30 XC2 (out), C1 VDD (power), C31 XC1 (in), D2 N.C. hidden, E1 VDDH (power), E31 VDD (power), F2 N.C. hidden, G1 VSS (power), G31 DECRF (power), H2 VSS (power), J1 DCCH (power), J31 VSS (power), L1 VDD (power), L31 ANT (io), N31 VDD (power), T2 N.C. hidden, U1 VDD (power), W31 SWDCLK (in)
part B pins: AA1 P0.03/NFC2 (io), AB2 P0.06/AIN2 (io), AD2 P0.07/AIN3 (io), AE31 P0.28/AIN7 (io), AH2 P0.08/TRACEDATA[3] (io), AJ1 P0.09/TRACEDATA[2] (io), AK2 P0.10/TRACEDATA[1] (io), AK4 P0.11/TRACEDATA[0] (io), AK6 P0.12/TRACECLK (io), AK8 P0.14/QSPI[1] (io), AK10 P0.15/QSPI[2] (io), AK12 P0.17/QSPI_CLK (io), AK14 P0.18/QSPI_CS (io), AK16 P0.20 (io), AK18 P0.22 (io), AK20 P0.23 (io), AK28 P0.25/AIN4 (io), AK30 P0.27/AIN6 (io), AL5 P0.13/QSPI[0] (io), AL9 P0.16/QSPI[3] (io), AL13 P0.19 (io), AL15 P0.21 (io), AL27 P0.24 (io), AL29 P0.26/AIN5 (io), B22 P0.31 (io), B24 P0.30 (io), N1 P0.00/XL1 (io), R1 P0.01/XL2 (io), U31 P0.29 (io), V2 P0.04/AIN0 (io), W1 P0.02/NFC1 (io), Y2 P0.05/AIN1 (io)
part C pins: A17 P1.13 (io), AE1 P1.02/I2C (io), AF2 P1.03/I2C (io), AK22 P1.05 (io), AK24 P1.07 (io), AK26 P1.09 (io), AL19 P1.04 (io), AL21 P1.06 (io), AL23 P1.08 (io), B14 P1.15 (io), B16 P1.14 (io), B18 P1.12 (io), B20 P1.11 (io), M2 P1.00 (io), P2 P1.01 (io), R31 P1.10 (io)
part A text: nRF5340


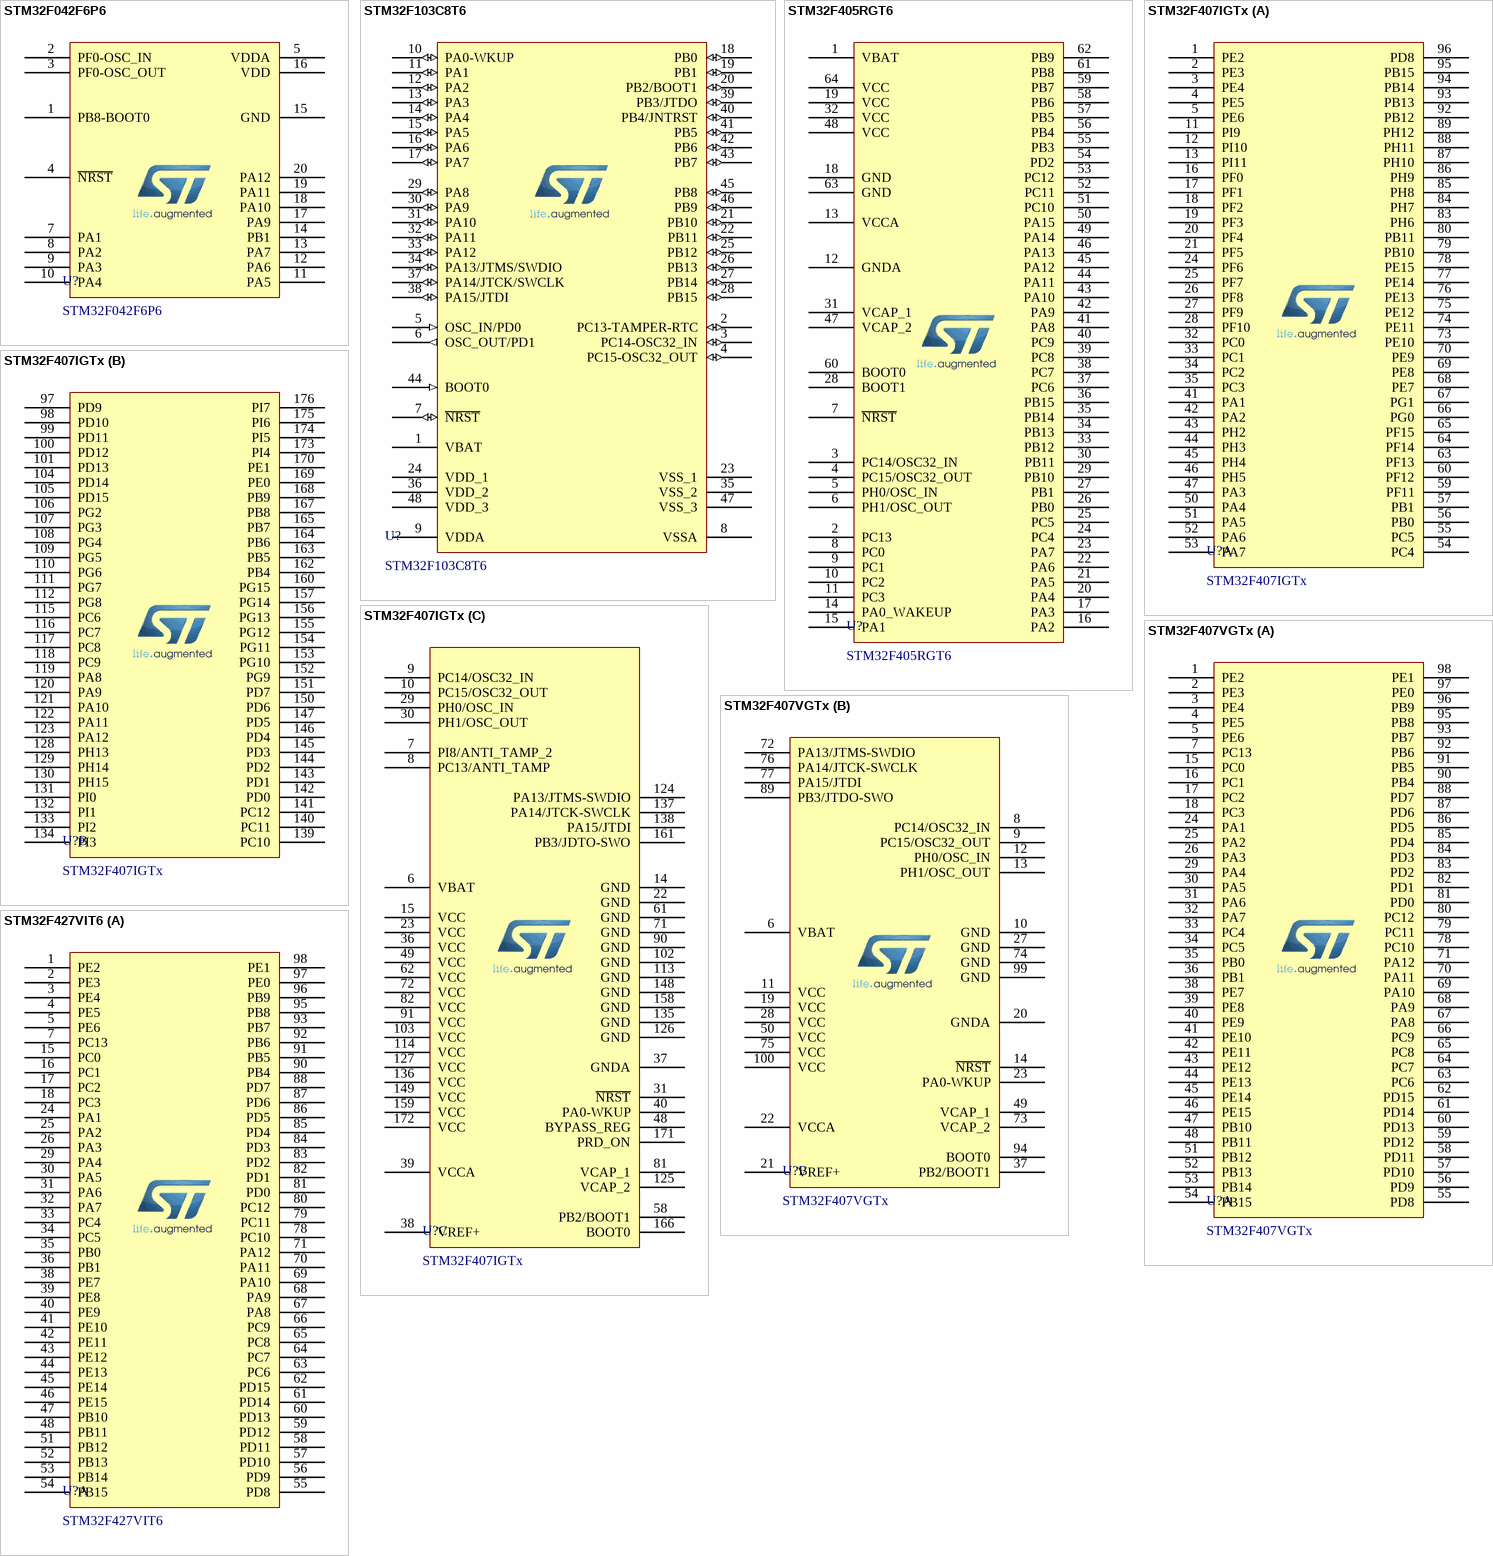
[diagram p4: symbols STM32F042F6P6 to STM32F427VIT6]

## STM32F042F6P6
designator U?
ARM Microcontrollers - MCU Mainstream Arm Cortex-M0 USB line MCU 32 Kbytes of Flash 48 MHz CPU, USB, CAN; Manufacturer: STMicroelectronics; Manufacturer Part Number: STM32F042F6P6TR; Pad count: 20; Supply Voltage - Max: 3.6 V; Supply Voltage - Min: 2 V; Part Number: STM32F042F6P6; Value: STM32F042F6P6; Supplier 1 URL: https://www.mouser.com/ProductDetail/STMicroelectronics/STM32F042F6P6?qs=4b8myOmUP%252BsTtpJfUMo83g%3D%3D; Supplier 2 URL: https://www.digikey.com/en/products/detail/stmicroelectronics/stm32f042f6p6tr/7313042; Supplier 3 URL: https://www.thegioiic.com/stm32f042f6p6-32-bit-arm-cortex-m0-microcontroller-48mhz-32kb-flash-20-tssop; Packaging: Tape and Reel; Supplier 1: Mouser; Supplier 1 Part Number: 511-STM32F042F6P6; Supplier 2: Digi-Key; Supplier 2 Part Number: 497-19656-2-ND; Supplier 3: thegioiic; Supplier 3 Part Number: STM32F042F6P6; Mount: SMD/SMT; Operating Temperature Max: + 85 C; Operating Temperature Min: - 40 C; Package / Case: TSSOP20; ComponentLink1Description: Datasheet; ComponentLink1URL: https://www.mouser.com/datasheet/2/389/stm32f042c4-1851049.pdf; LCSC Part #: N/A
footprint STM32F042F6P6 (TSOP, 20-Leads, Body 6.50x4.40mm, Pitch 0.65mm, IPC Medium Density)
pins: 1 PB8-BOOT0, 2 PF0-OSC_IN, 3 PF0-OSC_OUT, 4 ~{NRST}, 5 VDDA, 7 PA1, 8 PA2, 9 PA3, 10 PA4, 11 PA5, 12 PA6, 13 PA7, 14 PB1, 15 GND, 16 VDD, 17 PA9, 18 PA10, 19 PA11, 20 PA12

## STM32F103C8T6
designator U?
ARM Microcontrollers - MCU 32BIT Cortex M3 64KB 20KB RAM 2X12 ADC; Manufacturer: STMicroelectronics; Manufacturer Part Number: STM32F103C8T6TR; Pad count: 48; Supply Voltage - Max: 3.6 V; Supply Voltage - Min: 2 V; Part Number: STM32F103C8T6; Value: STM32F103C8T6; Supplier 1 URL: https://www.mouser.com/ProductDetail/STMicroelectronics/STM32F103C8T6?qs=bhCVus9SdFtq6kqxsU5%2FDA%3D%3D; Supplier 2 URL: https://www.digikey.com/en/products/detail/stmicroelectronics/stm32f103c8t6tr/2122442; Supplier 3 URL: https://www.thegioiic.com/stm32f103c8t6-32-bit-arm-cortex-m3-microcontroller-72mhz-64kb-flash-48-lqfp; Packaging: Tape and Reel; Supplier 1: Mouser; Supplier 1 Part Number: 511-STM32F103C8T6; Supplier 2: Digi-Key; Supplier 2 Part Number: 497-17666-2-ND; Supplier 3: thegioiic; Supplier 3 Part Number: STM32F103C8T6; Mount: SMD/SMT; Operating Temperature Max: + 85 C; Operating Temperature Min: - 40 C; Package / Case: LQFP48; ComponentLink1Description: Datasheet; ComponentLink1URL: https://www.mouser.com/datasheet/2/389/stm32f103c8-1851025.pdf; LCSC Part #: C8734
footprint STM32F103C8T6 (TSQFP, 48-Leads, Body 7.00x7.00mm, Pitch 0.50mm, IPC Medium Density)
pins: 1 VBAT (power), 2 PC13-TAMPER-RTC (io), 3 PC14-OSC32_IN (io), 4 PC15-OSC32_OUT (io), 5 OSC_IN/PD0 (in), 6 OSC_OUT/PD1 (out), 7 ~{NRST} (io), 8 VSSA (power), 9 VDDA (power), 10 PA0-WKUP (io), 11 PA1 (io), 12 PA2 (io), 13 PA3 (io), 14 PA4 (io), 15 PA5 (io), 16 PA6 (io), 17 PA7 (io), 18 PB0 (io), 19 PB1 (io), 20 PB2/BOOT1 (io), 21 PB10 (io), 22 PB11 (io), 23 VSS_1 (power), 24 VDD_1 (power), 25 PB12 (io), 26 PB13 (io), 27 PB14 (io), 28 PB15 (io), 29 PA8 (io), 30 PA9 (io), 31 PA10 (io), 32 PA11 (io), 33 PA12 (io), 34 PA13/JTMS/SWDIO (io), 35 VSS_2 (power), 36 VDD_2 (power), 37 PA14/JTCK/SWCLK (io), 38 PA15/JTDI (io), 39 PB3/JTDO (io), 40 PB4/JNTRST (io), 41 PB5 (io), 42 PB6 (io), 43 PB7 (io), 44 BOOT0 (in), 45 PB8 (io), 46 PB9 (io), 47 VSS_3 (power), 48 VDD_3 (power)

## STM32F405RGT6
designator U?
ARM Microcontrollers - MCU ARM M4 1024 FLASH 168 Mhz 192kB SRAM; Manufacturer: STMicroelectronics; Pad count: 64; Supply Voltage - Max: 3.6 V; Supply Voltage - Min: 2 V; Part Number: STM32F405RGT6; Value: STM32F405RGT6; Supplier 1 URL: https://www.mouser.com/ProductDetail/STMicroelectronics/STM32F405RGT6?qs=Z8%252BeY1k3TIKgj7QWsYGpQw%3D%3D; Supplier 2 URL: https://www.digikey.com/en/products/detail/stmicroelectronics/stm32f405rgt6/2754208; Supplier 3 URL: https://www.thegioiic.com/stm32f405rgt6; Manufacturer Part Number: STM32F405RGT6; Packaging: Tape and Reel; Supplier 1: Mouser; Supplier 1 Part Number: 511-STM32F405RGT6; Supplier 2: Digi-Key; Supplier 2 Part Number: 497-11767-ND; Supplier 3: thegioiic; Supplier 3 Part Number: STM32F405RGT6; Mount: SMD/SMT; Operating Temperature Max: + 85 C; Operating Temperature Min: - 40 C; Package / Case: LQFP64; ComponentLink1Description: Datasheet; ComponentLink1URL: https://www.mouser.com/datasheet/2/389/stm32f405rg-1851084.pdf; LCSC Part #: N/A
footprint STM32F405RGT6 (CQFP, 80-Leads, Body 12.00x12.00mm, Pitch 0.40mm, IPC Medium Density)
pins: 1 VBAT, 2 PC13, 3 PC14/OSC32_IN, 4 PC15/OSC32_OUT, 5 PH0/OSC_IN, 6 PH1/OSC_OUT, 7 ~{NRST}, 8 PC0, 9 PC1, 10 PC2, 11 PC3, 12 GNDA, 13 VCCA, 14 PA0_WAKEUP, 15 PA1, 16 PA2, 17 PA3, 18 GND, 19 VCC, 20 PA4, 21 PA5, 22 PA6, 23 PA7, 24 PC4, 25 PC5, 26 PB0, 27 PB1, 28 BOOT1, 29 PB10, 30 PB11, 31 VCAP_1, 32 VCC, 33 PB12, 34 PB13, 35 PB14, 36 PB15, 37 PC6, 38 PC7, 39 PC8, 40 PC9, 41 PA8, 42 PA9, 43 PA10, 44 PA11, 45 PA12, 46 PA13, 47 VCAP_2, 48 VCC, 49 PA14, 50 PA15, 51 PC10, 52 PC11, 53 PC12, 54 PD2, 55 PB3, 56 PB4, 57 PB5, 58 PB6, 59 PB7, 60 BOOT0, 61 PB8, 62 PB9, 63 GND, 64 VCC